# EAGLE library part M19 (library con_subd19)
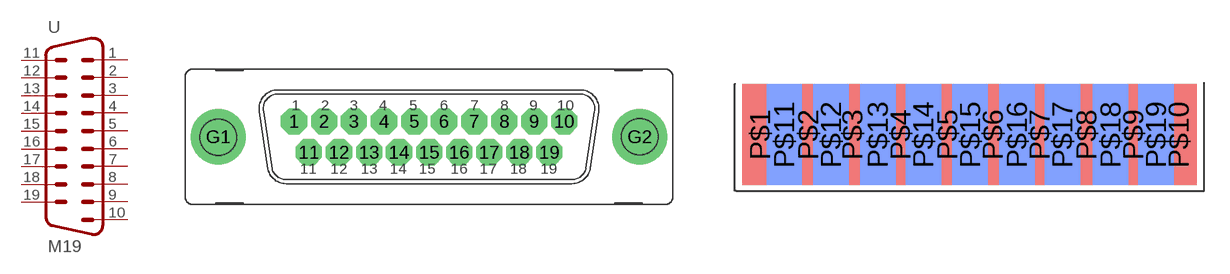
[diagram p0: symbol with the pads of M19; footprints M19, M19_EDGE]

Designator prefix -

## M19  [M19]
1  1  pas
2  2  pas
3  3  pas
4  4  pas
5  5  pas
6  6  pas
7  7  pas
8  8  pas
9  9  pas
10  10  pas
11  11  pas
12  12  pas
13  13  pas
14  14  pas
15  15  pas
16  16  pas
17  17  pas
18  18  pas
19  19  pas

## M19EDGE  [M19_EDGE]
P$1  1  pas
P$2  2  pas
P$3  3  pas
P$4  4  pas
P$5  5  pas
P$6  6  pas
P$7  7  pas
P$8  8  pas
P$9  9  pas
P$10  10  pas
P$11  11  pas
P$12  12  pas
P$13  13  pas
P$14  14  pas
P$15  15  pas
P$16  16  pas
P$17  17  pas
P$18  18  pas
P$19  19  pas

## Footprint M19 (pad centres in mm)
drill 1.6 pad 2 octagon: 1 -12.751,1.422; 2 -9.982,1.422; 3 -7.239,1.422; 4 -4.47,1.422; 5 -1.702,1.422; 6 1.041,1.422; 7 3.81,1.422; 8 6.579,1.422; 9 9.322,1.422; 10 12.09,1.422; 11 -11.379,-1.422; 12 -8.611,-1.422; 13 -5.842,-1.422; 14 -3.099,-1.422; 15 -0.33,-1.422; 16 2.438,-1.422; 17 5.182,-1.422; 18 7.95,-1.422; 19 10.719,-1.422
drill 3.302 pad 5.08: G1 -19.71,0; G2 19.03,0

## Footprint M19_EDGE (pad centres in mm)
smd 2.1 x 6: P$1 -12.462,-0.476; P$2 -9.604,-0.476; P$3 -6.985,-0.476; P$4 -4.128,-0.476; P$5 -1.349,-0.476; P$6 1.349,-0.476; P$7 4.128,-0.476; P$8 6.906,-0.476; P$9 9.684,-0.476; P$10 12.383,-0.476
smd 2.1 x 6 bottom: P$11 -11.033,-0.476; P$12 -8.255,-0.476; P$13 -5.477,-0.476; P$14 -2.778,-0.476; P$15 0,-0.476; P$16 2.778,-0.476; P$17 5.477,-0.476; P$18 8.334,-0.476; P$19 11.033,-0.476